# Altium schematic symbol library DS3231SNTR.SchLib: 1 symbol
Pins are listed as number, name and electrical type; pins without a type are passive.

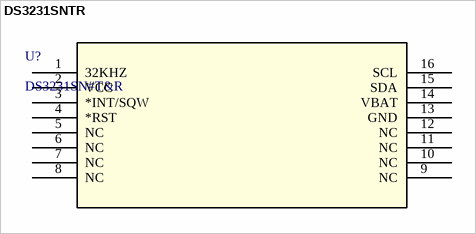
[diagram p0: symbol DS3231SNTR]

## DS3231SNTR
designator U?, comment DS3231SN#T&R
Extremely Accurate IÂ²C-Integrated RTC/TCXO/Crystal; Manufacturer_Name: Analog Devices Inc; Copyright: Copyright (C) 2025 Ultra Librarian. All rights reserved.; Manufacturer_Part_Number: DS3231SN#T&R; RefDes: RefDes; Type: Type
footprint 21-0042B_16_MXM
pins: 1 32KHZ, 2 VCC (power), 3 *INT/SQW, 4 *RST, 5 NC, 6 NC, 7 NC, 8 NC, 9 NC, 10 NC, 11 NC, 12 NC, 13 GND (power), 14 VBAT (power), 15 SDA, 16 SCL